# Altium footprint library uw-madison-parts.PcbLib: 40 footprints (part 2 of 3)
Each footprint in its own frame and in the unit in brackets; x right, y up, seen from the top. Pads: shape width x height; smd on the part's side, far side on the other; paste and mask are expansions set on the pad; w line width, h text height; cw(c..) or ccw(c..) is an arc to the next point about the centre after c.
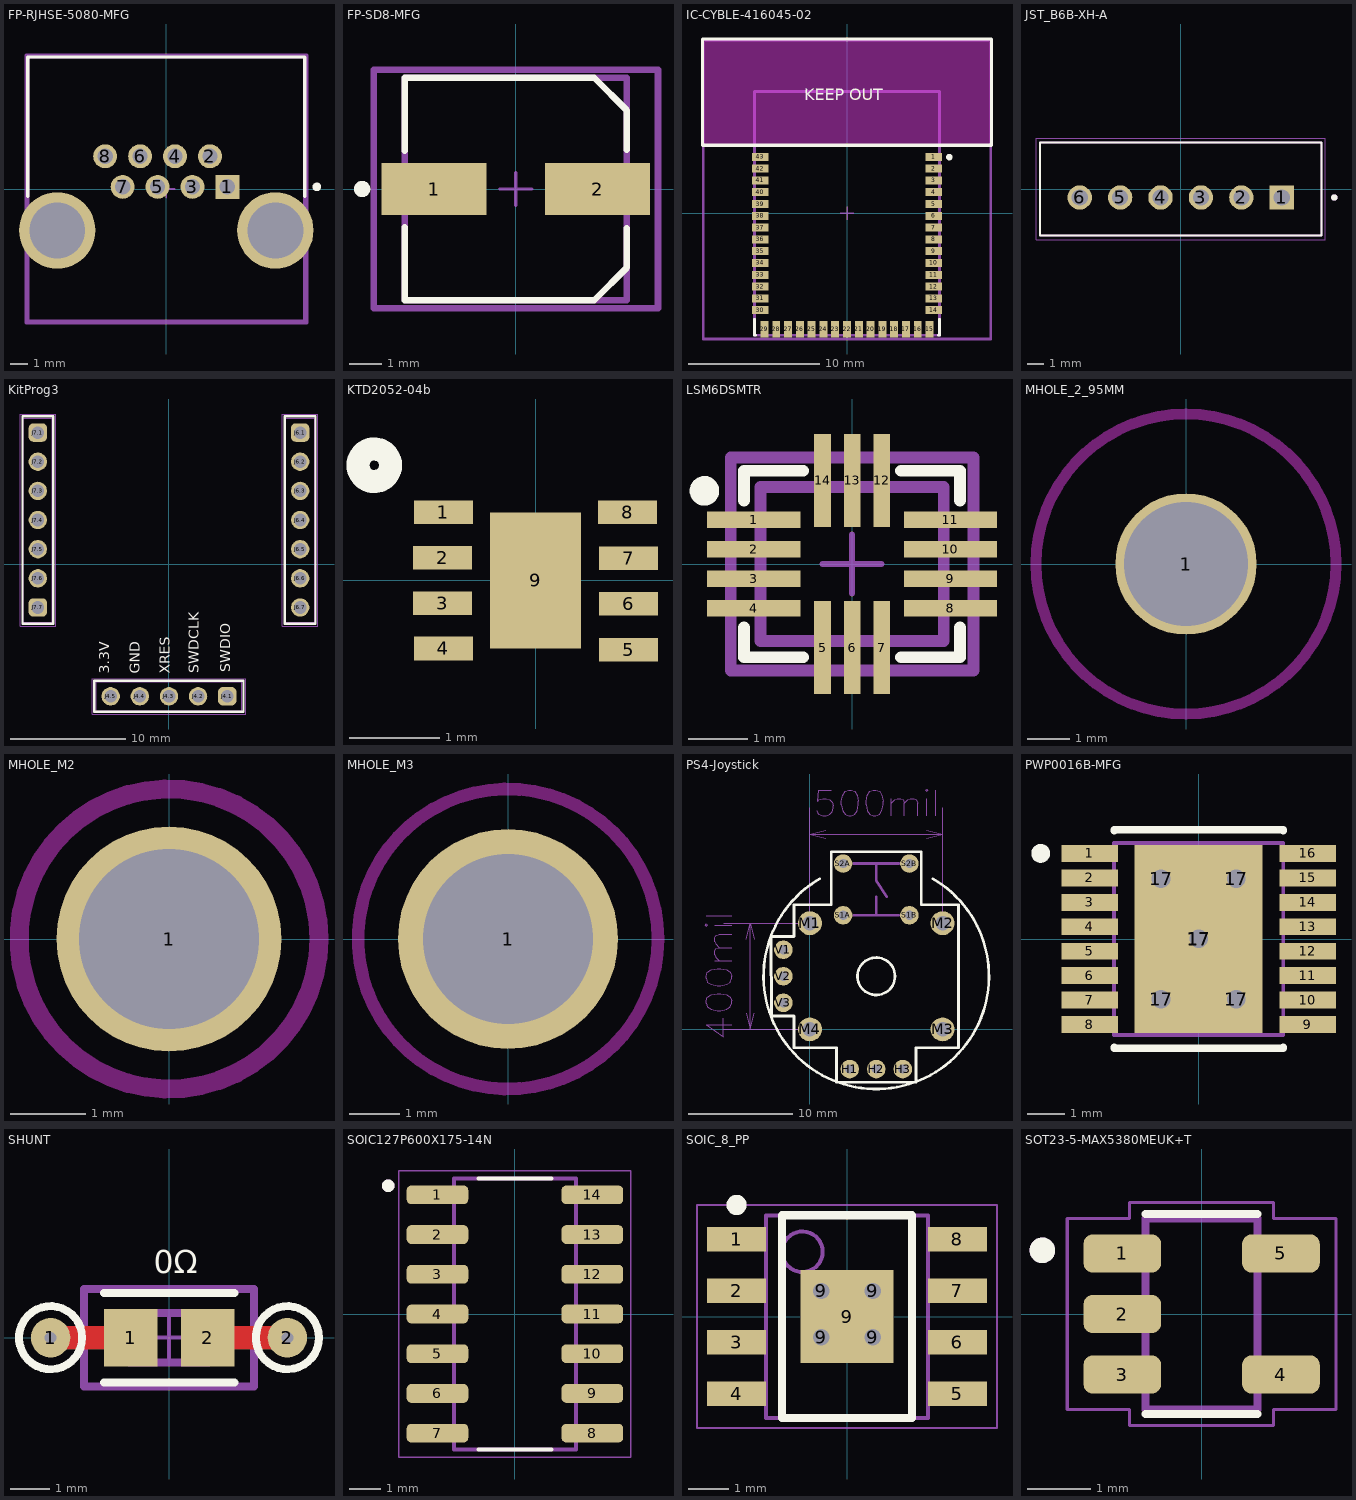
[diagram p1: the footprints below, top view; thin cyan lines are the x and y axes]

## FP-RJHSE-5080-MFG [mm]
pads (10):
  rect 1.39x1.39 hole 0.89 paste-2539.97 mask+0: 1(3.556,0.127)
  round 1.39 hole 0.89 paste-2539.97 mask+0: 2(2.54,1.905) 3(1.524,0.127) 4(0.508,1.905) 5(-0.508,0.127) 6(-1.524,1.905) 7(-2.54,0.127) 8(-3.556,1.905)
  round 4.445 hole 3.25 unplated paste-2539.97 mask+0: ""(-6.35,-2.413) ""(6.35,-2.413)
Top Overlay:
  circle w0.25: c8.765,0.127 r0.125
  lines w0.2: -8.064,-0.413 -8.064,7.683 8.064,7.683 8.064,-0.413
Top 3D Body:
  lines w0.2: -8.064,-7.683 8.064,-7.683 8.064,7.683 -8.064,7.683 -8.064,-7.683
Top Courtyard:
  lines w0.2: -8.164,-7.783 8.164,-7.783 8.164,7.783 -8.164,7.783 -8.164,-7.783
Top Assembly:
  lines w0.2: -8.164,-7.783 8.164,-7.783 8.164,7.783 -8.164,7.783 -8.164,-7.783
  text ".Designator" at 0,-0.001 h1
Top Component Center:
  lines w0.1: -0.5,0 0.5,0 ; 0,-0.5 0,0.5
3D body "Conn_Amphenol_RJHSE-5080_eec.STEP": height 0.25, standoff 0, extent -8.164,-7.783 8.164,7.783

## FP-SD8-MFG [mm]
pads (2):
  rect 3.2x1.6 smd paste+0 mask+0: 1(-2.5,0) 2(2.5,0)
Top Overlay:
  circle w0.25: c-4.7,0 r0.125
  lines w0.2: -3.4,-1.175 -3.4,-3.4 2.4,-3.4 3.4,-2.4 3.4,-1.2 ; -3.4,1.175 -3.4,3.4 2.4,3.4 3.4,2.4 3.4,1.2
Top 3D Body:
  lines w0.2: -3.4,-3.4 3.4,-3.4 3.4,3.4 -3.4,3.4 -3.4,-3.4
Top Courtyard:
  lines w0.2: -4.35,-3.65 4.35,-3.65 4.35,3.65 -4.35,3.65 -4.35,-3.65
Top Assembly:
  lines w0.2: -4.35,-3.65 4.35,-3.65 4.35,3.65 -4.35,3.65 -4.35,-3.65
  text ".Designator" at 0,0.188 h1
Top Component Center:
  lines w0.1: -0.5,0 0.5,0 ; 0,-0.5 0,0.5
3D body "Cap_Panasonic_Electronic_Components_EEE-1HA470XP_eec.STEP": height 0.25, standoff 0, extent -4.35,-3.65 4.35,3.65

## IC-CYBLE-416045-02 [mm]
pads (43):
  rect 1.27x0.61 smd paste+0 mask+0: 1(6.619,4.32) 2(6.619,3.42) 3(6.619,2.52) 4(6.619,1.62) 5(6.619,0.71) 6(6.619,-0.19) 7(6.619,-1.09) 8(6.619,-1.99) 9(6.619,-2.89) 10(6.619,-3.79) 11(6.619,-4.7) 12(6.619,-5.6) 13(6.619,-6.5) 14(6.619,-7.4) 30(-6.619,-7.4) 31(-6.619,-6.5) 32(-6.619,-5.6) 33(-6.619,-4.7) 34(-6.619,-3.79) 35(-6.619,-2.89) 36(-6.619,-1.99) 37(-6.619,-1.09) 38(-6.619,-0.19) 39(-6.619,0.71) 40(-6.619,1.62) 41(-6.619,2.52) 42(-6.619,3.42) 43(-6.619,4.32)
  rect 0.61x1.27 smd paste+0 mask+0: 15(6.31,-8.869) 16(5.41,-8.869) 17(4.51,-8.869) 18(3.61,-8.869) 19(2.71,-8.869) 20(1.8,-8.869) 21(0.9,-8.869) 22(0,-8.869) 23(-0.9,-8.869) 24(-1.8,-8.869) 25(-2.7,-8.869) 26(-3.61,-8.869) 27(-4.51,-8.869) 28(-5.41,-8.869) 29(-6.31,-8.869)
Top Overlay:
  circle w0.25: c7.825,4.305 r0.125
  lines w0.2: -7.075,-8.08 -7.075,-9.325 -6.99,-9.325 ; 6.99,-9.325 7.075,-9.325 7.075,-8.08
  lines w0.254: -11.049,5.207 -11.049,13.335 11.049,13.335 11.049,5.207 -11.049,5.207
  text "KEEP OUT" at -3.277,8.661 h0.89
Keep-Out Layer:
  rectangle: -11,5.207 11,13.25
  rectangle: -11,5.207 11,13.25
Board:
  lines w0.2: -7.075,-9.325 7.075,-9.325 7.075,9.325 -7.075,9.325 -7.075,-9.325
Top Courtyard:
  lines w0.2: -11,-9.604 11,-9.604 11,13.25 -11,13.25 -11,-9.604
Top Assembly:
  lines w0.2: -11,-9.604 11,-9.604 11,13.25 -11,13.25 -11,-9.604
  text ".Designator" at 0,2.011 h1
Top Component Center:
  lines w0.1: -0.5,0 0.5,0 ; 0,-0.5 0,0.5
3D body "UNK_Cypress_Semiconductor_CYBLE-416045-02_eec.STEP": height 0.25, standoff 0, extent -11,-9.604 11,13.25

## JST_B6B-XH-A [mm]
height 7
pads (6):
  rect 1.508x1.508 / inner round 1.508 / far side rect 1.508x1.508 hole 1: 1(6.25,-0.525)
  round 1.508 hole 1: 2(3.75,-0.525) 3(1.25,-0.525) 4(-1.25,-0.525) 5(-3.75,-0.525) 6(-6.25,-0.525)
Top Overlay:
  circle w0.2: c9.5,-0.525 r0.1
  lines w0.127: -8.7,-2.875 8.7,-2.875 8.7,2.875 -8.7,2.875 -8.7,-2.875
Mechanical 13:
  circle w0.2: c9.5,-0.525 r0.1
  lines w0.127: -8.7,-2.875 8.7,-2.875 8.7,2.875 -8.7,2.875 -8.7,-2.875
Mechanical 15:
  lines w0.05: -8.95,-3.125 8.95,-3.125 8.95,3.125 -8.95,3.125 -8.95,-3.125
3D body "B6B-XH-A.step": height 7, standoff -3.4, extent -8.7,-2.875 8.7,2.875

## KitProg3 [mm] "KitProg3 found on the CY8CPROTO-BLE-063"
pads (19):
  rrect50% 1.6x1.6 hole 1.1: J4.1(5.075,-11.49) J6.1(11.43,11.49) J7.1(-11.43,11.49) J7.7(-11.43,-3.75)
  round 1.6 hole 1.1: J4.2(2.535,-11.49) J4.3(-0.005,-11.49) J4.4(-2.545,-11.49) J4.5(-5.085,-11.49) J6.2(11.43,8.95) J6.3(11.43,6.41) J6.4(11.43,3.87) J6.5(11.43,1.33) J6.6(11.43,-1.21) J6.7(11.43,-3.75) J7.2(-11.43,8.95) J7.3(-11.43,6.41) J7.4(-11.43,3.87) J7.5(-11.43,1.33) J7.6(-11.43,-1.21)
Top Overlay:
  lines w0.2: -12.77,-5.17 -12.77,12.91 -10.08,12.91 -10.08,-5.17 -12.77,-5.17 ; -6.505,-12.835 6.495,-12.835 6.495,-10.145 -6.505,-10.145 -6.505,-12.835 ; 10.08,-5.17 10.08,12.91 12.77,12.91 12.77,-5.17 10.08,-5.17
  text "SWDIO" at 5.63,-9.386 h1.5
  text "SWDCLK" at 2.891,-9.485 h1.5
  text "XRES" at 0.356,-9.524 h1.5
  text "3.3V" at -4.882,-9.513 h1.5
  text "GND" at -2.226,-9.526 h1.5
Top Courtyard:
  lines w0.05: -12.97,-5.37 -9.88,-5.37 -9.88,13.11 -12.97,13.11 -12.97,-5.37 ; -6.705,-13.035 -6.705,-9.945 6.695,-9.945 6.695,-13.035 -6.705,-13.035 ; 9.88,-5.37 12.97,-5.37 12.97,13.11 9.88,13.11 9.88,-5.37
Top Designator:
Top Component Outline:
  lines w0.1: -12.695,-5.02 -10.155,-5.02 -10.155,12.76 -12.695,12.76 -12.695,-5.02 ; -6.355,-12.76 -6.355,-10.22 6.345,-10.22 6.345,-12.76 -6.355,-12.76 ; 10.155,-5.02 10.155,12.76 12.695,12.76 12.695,-5.02 10.155,-5.02
Top Component Center:
  lines w0.05: -11.43,3.37 -11.425,4.37 ; -11.43,3.87 -10.925,3.87 ; -0.505,-11.49 0.495,-11.49 ; -0.005,-11.99 -0.005,-10.99 ; 10.925,3.87 11.925,3.87 ; 11.425,3.37 11.425,4.37
3D body "61300511121.stp": height 8.57, standoff -2.97, extent -6.35,-12.76 6.35,-10.22
3D body "61300711121.stp": height 8.57, standoff -2.97, extent 10.16,-5.02 12.7,12.76
3D body "61300711121.stp": height 8.57, standoff -2.97, extent -12.7,-5.02 -10.16,12.76

## KTD2052-04b [mm]
pads (9):
  rect 0.65x0.26 smd mask+0.09: 1(-1.016,0.75) 2(-1.025,0.25) 3(-1.025,-0.25) 4(-1.016,-0.75) 5(1.025,-0.762) 6(1.025,-0.258) 7(1.025,0.246) 8(1.016,0.75)
  rect 1x1.5 smd mask+0.09: 9(0,0)
Top Overlay:
  circle w0.254: c-1.778,1.27 r0.18

## LSM6DSMTR [mm]
pads (14):
  rect 1.575x0.28 smd paste+0 mask+0: 1(-1.662,0.75) 2(-1.662,0.25) 3(-1.662,-0.25) 4(-1.662,-0.75) 8(1.662,-0.75) 9(1.662,-0.25) 10(1.662,0.25) 11(1.662,0.75)
  rect 0.28x1.575 smd paste+0 mask+0: 5(-0.5,-1.413) 6(0,-1.413) 7(0.5,-1.413) 12(0.5,1.413) 13(0,1.413) 14(-0.5,1.413)
Top Overlay:
  circle w0.25: c-2.497,1.237 r0.125
  lines w0.2: -1.825,-1.075 -1.825,-1.575 -0.825,-1.575 ; -1.825,1.075 -1.825,1.575 -0.825,1.575 ; 0.825,-1.575 1.825,-1.575 1.825,-1.075 ; 0.825,1.575 1.825,1.575 1.825,1.075
Top 3D Body:
  lines w0.2: -1.55,-1.3 1.55,-1.3 1.55,1.3 -1.55,1.3 -1.55,-1.3
Top Courtyard:
  lines w0.2: -2.05,-1.8 2.05,-1.8 2.05,1.8 -2.05,1.8 -2.05,-1.8
Top Assembly:
  lines w0.2: -2.05,-1.8 2.05,-1.8 2.05,1.8 -2.05,1.8 -2.05,-1.8
  text ".Designator" at 0,0.188 h1
Top Component Center:
  lines w0.1: -0.5,0 0.5,0 ; 0,-0.5 0,0.5
3D body "IC_STMicroelectronics_LSM6DSMTR_eec.STEP": height 0.25, standoff 0, extent -2.05,-1.8 2.05,1.8

## MHOLE_2_95MM [mm]
pads (1):
  round 3.3 hole 2.9 mask-2539.97: 1(0,0)
Top Solder:
  circle w1.75: c0,0 r0.875
Bottom Solder:
  circle w1.75: c0,0 r0.875
Keep-Out Layer:
  circle w0.254: c0,0 r3.5

## MHOLE_M2 [mm]
pads (1):
  round 3 hole 2.4 mask-2539.97: 1(0,0)
Top Solder:
  circle w1.75: c0,0 r0.875
Bottom Solder:
  circle w1.75: c0,0 r0.875
Keep-Out Layer:
  circle w0.254: c0,0 r2

## MHOLE_M3 [mm]
pads (1):
  round 4.4 hole 3.4 mask-2539.97: 1(0,0)
Top Solder:
  circle w2.5: c0,0 r1.25
Bottom Solder:
  circle w2.5: c0,0 r1.25
Keep-Out Layer:
  circle w0.254: c0,0 r3

## PS4-Joystick [mil]
pads (14):
  round 70 hole 35: H1(150,-150) H2(250,-150) H3(350,-150) S1A(125,430) S1B(375,430) S2A(125,625) S2B(375,625) V1(-100,300) V2(-100,200) V3(-100,100)
  round 90 hole 55: M1(0,400) M2(500,400) M3(500,0) M4(0,0)
Top Overlay:
  circle w10: c250,200 r70.71
  lines w10: 37.5,568.06 ccw(c250,200) 462.5,568.06 ; -147,350 -60,350 -60,470 80,470 80,670 420,670 420,470 560,470 560,-70 400,-70 400,-200 100,-200 100,-70 -60,-70 -60,50 -140,50 -145,50 -147,350
Mechanical 15:
  lines w4: -391.08,427.23 -295.68,427.23 ; -359.28,258.13 -295.68,258.13 ; -359.28,392.73 -295.68,392.73 ; -341.08,258.13 -354.78,271.83 -359.28,280.93 -359.28,294.53 -354.78,303.63 -341.08,308.13 ; -327.48,40.93 -327.48,-27.27 -391.08,18.13 -295.68,18.13 ; -325.21,0 0,0 ; -325.21,400 0,400 0,835.56 ; -295.68,308.13 -341.08,308.13 ; -295.68,358.13 -341.08,358.13 -354.78,353.63 -359.28,344.53 -359.28,330.93 -354.78,321.83 -341.08,308.13 ; -240.21,60 -225.21,0 ; -240.21,340 -225.21,400 ; -210.21,60 -225.21,0 ; -210.21,340 -225.21,400 ; 25,824.2 29.5,815.1 34.1,810.6 47.7,806 61.4,806 75,810.6 84.1,819.7 88.6,833.3 88.6,842.4 84.1,856 75,865.1 61.4,869.7 47.7,869.7 34.1,865.1 29.5,860.6 34.1,901.5 79.5,901.5 ; 60,720.56 0,735.56 ; 60,750.56 0,735.56 ; 305.9,806 305.9,869.7 ; 305.9,851.5 319.5,865.1 328.6,869.7 342.3,869.7 351.4,865.1 355.9,851.5 ; 355.9,806 355.9,851.5 ; 405.9,806 405.9,851.5 401.4,865.1 392.3,869.7 378.6,869.7 369.5,865.1 355.9,851.5 ; 440,720.56 500,735.56 ; 440,750.56 500,735.56 ; 440.5,806 440.5,869.7 ; 475,806 475,901.5 ; 500,400 500,835.56 ; -225.21,0 -225.21,400 ; 0,735.56 500,735.56 ; -395.68,392.73 -391.08,388.13 -386.58,392.73 -391.08,397.23 -395.68,392.73 ; -391.08,98.13 -391.08,107.23 -386.58,120.93 -372.98,130.03 -350.18,134.53 -336.58,134.53 -313.88,130.03 -300.18,120.93 -295.68,107.23 -295.68,98.13 -300.18,84.53 -313.88,75.43 -336.58,70.93 -350.18,70.93 -372.98,75.43 -386.58,84.53 -391.08,98.13 ; -391.08,191.83 -391.08,200.93 -386.58,214.53 -372.98,223.63 -350.18,228.13 -336.58,228.13 -313.88,223.63 -300.18,214.53 -295.68,200.93 -295.68,191.83 -300.18,178.13 -313.88,169.13 -336.58,164.53 -350.18,164.53 -372.98,169.13 -386.58,178.13 -391.08,191.83 ; 118.6,846.9 123.2,824.2 132.3,810.6 145.9,806 155,806 168.6,810.6 177.7,824.2 182.3,846.9 182.3,860.6 177.7,883.3 168.6,896.9 155,901.5 145.9,901.5 132.3,896.9 123.2,883.3 118.6,860.6 118.6,846.9 ; 212.3,846.9 216.8,824.2 225.9,810.6 239.5,806 248.6,806 262.3,810.6 271.4,824.2 275.9,846.9 275.9,860.6 271.4,883.3 262.3,896.9 248.6,901.5 239.5,901.5 225.9,896.9 216.8,883.3 212.3,860.6 212.3,846.9 ; 435.9,901.5 440.5,906 445,901.5 440.5,896.9 435.9,901.5
  lines w10: 165,430 335,430 ; 165,625 335,625 ; 250.02,430 250,500 ; 250,625 250,560 290,500

## PWP0016B-MFG [mm]
pads (22):
  rect 1.5x0.45 smd paste+0 mask+0: 1(-2.9,2.275) 2(-2.9,1.625) 3(-2.9,0.975) 4(-2.9,0.325) 5(-2.9,-0.325) 6(-2.9,-0.975) 7(-2.9,-1.625) 8(-2.9,-2.275) 9(2.9,-2.275) 10(2.9,-1.625) 11(2.9,-0.975) 12(2.9,-0.325) 13(2.9,0.325) 14(2.9,0.975) 15(2.9,1.625) 16(2.9,2.275)
  round 1 hole 0.5: 17(-1,-1.6) 17(-1,1.6) 17(0.003,0.008) 17(1,-1.6) 17(1,1.6)
  rect 3.4x5 smd paste-2.487 mask-2.489: 17(0,0)
Top Overlay:
  circle w0.25: c-4.2,2.275 r0.125
  lines w0.2: -2.25,-2.875 -2.25,-2.9 2.25,-2.9 2.25,-2.875 ; -2.25,2.875 -2.25,2.9 2.25,2.9 2.25,2.875
Top Paste:
  region: 1.45,1.5 1.5,1.45 1.5,-1.45 1.45,-1.5 -1.45,-1.5 -1.5,-1.45 -1.5,1.45 -1.45,1.5
Top Solder:
  region: 1.45,1.5 1.5,1.45 1.5,-1.45 1.45,-1.5 -1.45,-1.5 -1.5,-1.45 -1.5,1.45 -1.45,1.5
Mechanical 13:
  lines w0.1: -2.25,-2.55 -2.25,2.55 2.25,2.55 2.25,-2.55 -2.25,-2.55

## SHUNT [mm] "Shut"
pads (4):
  round 1 hole 0.3: 1(-3,0) 2(3,0)
  rect 1.355x1.462 smd paste+0 mask+0: 1(-0.972,0) 2(0.98,0)
Top Layer:
  lines w0.6: -3,0 -0.972,0 ; 0.98,0 3,0
Top Overlay:
  circle w0.2: c3,0 r0.8
  circle w0.2: c-3,0 r0.8
  lines w0.2: -1.649,-1.131 1.657,-1.131 ; -1.649,1.131 1.657,1.131
  text "0Ω" at -0.386,1.433 h1
Bottom Overlay:
  circle w0.2: c3,-0.003 r0.8
  circle w0.2: c-3,-0.003 r0.8
Board:
  lines w0.2: -0.996,-0.625 -0.996,0.625 1.004,0.625 1.004,-0.625 -0.996,-0.625
Top Courtyard:
  lines w0.2: -2.149,-1.231 -2.149,1.231 2.157,1.231 2.157,-1.231 -2.149,-1.231
Top Assembly:
  lines w0.2: -2.149,-1.231 -2.149,1.231 2.157,1.231 2.157,-1.231 -2.149,-1.231
  text ".Designator" at 0.004,0.188 h1
Top Component Center:
  lines w0.1: -0.496,0 0.504,0 ; 0.004,-0.5 0.004,0.5
3D body "Res_Stackpole_Electronics_RMCF0805ZT0R00_eec.STEP": height 0.25, standoff 0, extent -2.149,-1.231 2.157,1.231

## SOIC127P600X175-14N [mm]
pads (14):
  rrect50% 1.97x0.6 smd: 1(-2.475,3.81) 2(-2.475,2.54) 3(-2.475,1.27) 4(-2.475,0) 5(-2.475,-1.27) 6(-2.475,-2.54) 7(-2.475,-3.81) 8(2.475,-3.81) 9(2.475,-2.54) 10(2.475,-1.27) 11(2.475,0) 12(2.475,1.27) 13(2.475,2.54) 14(2.475,3.81)
Top Overlay:
  circle w0.2: c-4.05,4.1 r0.1
  lines w0.127: -1.17,-4.325 1.17,-4.325 ; -1.17,4.325 1.17,4.325
Mechanical 13:
  circle w0.2: c-4.05,4.1 r0.1
  lines w0.127: -1.95,-4.325 1.95,-4.325 1.95,4.325 -1.95,4.325 -1.95,-4.325
Mechanical 15:
  lines w0.05: -3.71,-4.575 3.71,-4.575 3.71,4.575 -3.71,4.575 -3.71,-4.575

## SOIC_8_PP [mm] "SOIC, 8-Leads, Body 4.90x3.90mm, Pitch 1.27mm, Thermal Pad 2.29x2.29mm, IPC Medium Density"
height 1.7
pads (13):
  rect 1.45x0.6 smd: 1(-2.725,1.905) 2(-2.725,0.635) 3(-2.725,-0.635) 4(-2.725,-1.905) 5(2.725,-1.905) 6(2.725,-0.635) 7(2.725,0.635) 8(2.725,1.905)
  round 0.8 hole 0.4: 9(-0.635,-0.508) 9(-0.635,0.635) 9(0.635,-0.508) 9(0.635,0.635)
  rect 2.29x2.29 smd: 9(0,0)
Top Overlay:
  circle w0.25: c-2.725,2.755 r0.125
  lines w0.2: -1.6,-2.5 1.6,-2.5 1.6,2.5 -1.6,2.5 -1.6,-2.5
Top Courtyard:
  lines w0.05: -3.7,-2.75 3.7,-2.75 3.7,2.75 -3.7,2.75 -3.7,-2.75
  lines w0.1: -0.5,0 0.5,0 ; 0,-0.5 0,0.5
Top Assembly:
  circle w0.1: c-1.1,1.6 r0.5
  lines w0.1: -2,-2.5 2,-2.5 2,2.5 -2,2.5 -2,-2.5
3D body "SOIC127P600X170_HS-9N.step": height 1.7, standoff 0, extent -3,-2.5 3,2.5

## SOT23-5-MAX5380MEUK+T [mm]
pads (5):
  rrect50% 1.22x0.6 smd: 1(-1.245,0.95) 2(-1.245,0) 3(-1.245,-0.95) 4(1.245,-0.95) 5(1.245,0.95)
Top Overlay:
  circle w0.2: c-2.5,1 r0.1
  lines w0.127: -0.88,-1.57 0.88,-1.57 ; -0.88,1.57 0.88,1.57
Mechanical 13:
  circle w0.2: c-2.5,1 r0.1
  lines w0.127: -0.88,-1.5 -0.88,1.5 0.88,1.5 0.88,-1.5 -0.88,-1.5
Mechanical 15:
  lines w0.05: -2.11,-1.5 -1.13,-1.5 -1.13,-1.75 1.13,-1.75 1.13,-1.5 2.11,-1.5 2.11,1.5 1.13,1.5 1.13,1.75 -1.13,1.75 -1.13,1.5 -2.11,1.5 -2.11,-1.5